# Altium schematic symbol library PrzejścieTHT10.SchLib: 1 symbol
Pins are listed as number, name and electrical type; pins without a type are passive.

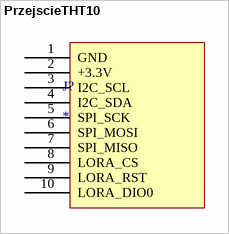
[diagram p0: symbol PrzejscieTHT10]

## PrzejscieTHT10
designator J?
footprint PrzejscieTHT10
pins: 1 GND, 2 +3.3V, 3 I2C_SCL, 4 I2C_SDA, 5 SPI_SCK, 6 SPI_MOSI, 7 SPI_MISO, 8 LORA_CS, 9 LORA_RST, 10 LORA_DIO0